# Altium integrated library SMAJ5.0A.IntLib: 1 symbol
Pins are listed as number, name and electrical type; pins without a type are passive.

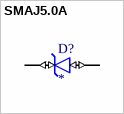
[diagram p0: symbol SMAJ5.0A]

## SMAJ5.0A
designator D?
A 5.0V, 400W, uni-directional, SMA pkg TVS Diode | Bourns SMAJ5.0A; SnapEDA_Link: https://www.snapeda.com/parts/SMAJ5.0A/Bourns/view-part/?ref=snap; Package: DO-214 Bourns; Value: *; MF: Bourns; MP: SMAJ5.0A; Check_prices: https://www.snapeda.com/parts/SMAJ5.0A/Bourns/view-part/?ref=eda
footprint DIOM5026X229N
pins: 1 K (io), 2 A (io)